# Altium schematic symbol library NTM_Other_Passives.SchLib: 12 symbols
Pins are listed as number, name and electrical type; pins without a type are passive.

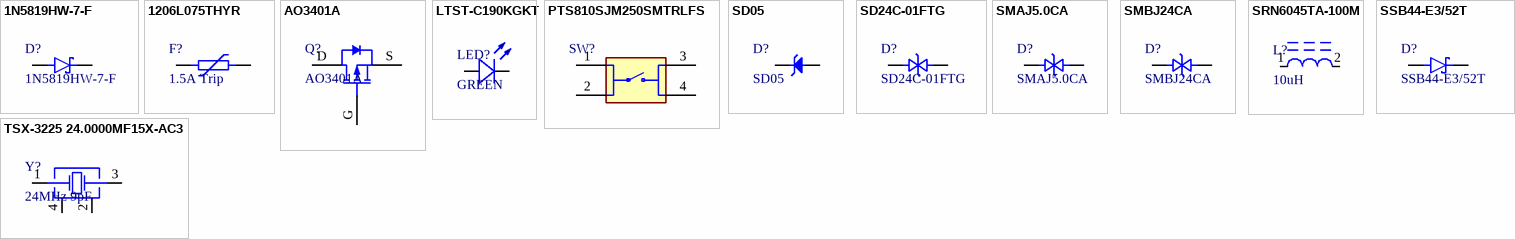
[diagram p0: symbols 1N5819HW-7-F to TSX-3225 24.0000MF15X-AC3]

## 1N5819HW-7-F
designator D?
1N5819HW Series 40 V 1 A Surface Mount Schottky Barrier Rectifier - SOD-123; Manufacturer: Diodes Inc.; Average Rectified Current: 1A; Capacitance: 50pF; Element Configuration: Single; Forward Voltage: 750mV; Max Forward Surge Current (Ifsm): 25A; Max Junction Temperature (Tj): 125°C; Max Power Dissipation: 450mW; Max Repetitive Reverse Voltage (Vrrm): 40V; Number of Elements: 1; Peak Reverse Current: 1mA; Polarity: Standard; Supplier 1: DigiKey; Manufacturer Part Number: 1N5819HW-7-F; RoHS: Compliant; Category: Schottky Diodes; Stock 1: 1016143; Pricing 1: 1=0.29, 10=0.178, 100=0.1108, 500=0.08152, 1000=0.07202 (USD); Case/Package: SOD-123-2; China RoHS: Compliant; Contact Plating: Tin; Current Rating: 1A; Forward Current: 1A; Height: 1.45mm; Lead Free: Lead Free; Length: 2.85mm; Lifecycle Status: Production; Max Operating Temperature: 125°C; Max Output Current: 1A; Max Reverse Voltage (DC): 40V; Min Breakdown Voltage: 40V; Min Operating Temperature: -65°C; Number of Pins: 2; Number of Terminals: 2; Output Current: 1A; Packaging: Tape and Reel; Peak Non-Repetitive Surge Current: 25A; Radiation Hardening: No; REACH SVHC: Yes; Reverse Standoff Voltage: 40V; Reverse Voltage: 40V; Schedule B: 8541100080, 8541100080|8541100080|8541100080|8541100080|8541100080; Termination: SMD/SMT; Voltage Rating (DC): 40V; Weight: 10.007382mg; Width: 1.7mm; ComponentLink1URL: https://datasheet.octopart.com:443/1N5819HW-7-F-Diodes-Inc.-datasheet-180549196.pdf?src-supplier=IHS; ComponentLink1Description: https://datasheet.octopart.com:443/1N5819HW-7-F-Diodes-Inc.-datasheet-180549196.pdf?src-supplier=IHS; ComponentLink2URL: https://datasheet.octopart.com:443/1N5819HW-7-F-Diodes-Inc.-datasheet-8332965.pdf?src-supplier=Upverter; ComponentLink2Description: https://datasheet.octopart.com:443/1N5819HW-7-F-Diodes-Inc.-datasheet-8332965.pdf?src-supplier=Upverter; ComponentLink3URL: https://sigma.octopart.com:443/138895985/technical_drawing/Diodes-Inc.-1N5819HW-7-F.pdf?src-supplier=Upverter; ComponentLink3Description: https://sigma.octopart.com:443/138895985/technical_drawing/Diodes-Inc.-1N5819HW-7-F.pdf?src-supplier=Upverter; ComponentLink4URL: https://datasheet.octopart.com:443/1N5819HW-7-F-Diodes-Inc.-datasheet-134530231.pdf?src-supplier=Future+Electronics; ComponentLink4Description: https://datasheet.octopart.com:443/1N5819HW-7-F-Diodes-Inc.-datasheet-134530231.pdf?src-supplier=Future+Electronics; ComponentLink5URL: https://datasheet.octopart.com:443/1N5819HW-7-F-Diodes-Inc.-datasheet-34441420.pdf?src-supplier=Future+Electronics; ComponentLink5Description: https://datasheet.octopart.com:443/1N5819HW-7-F-Diodes-Inc.-datasheet-34441420.pdf?src-supplier=Future+Electronics; ComponentLink6URL: https://datasheet.octopart.com:443/1N5819HW-7-F-Diodes-Inc.-datasheet-10497210.pdf?src-supplier=Future+Electronics; ComponentLink6Description: https://datasheet.octopart.com:443/1N5819HW-7-F-Diodes-Inc.-datasheet-10497210.pdf?src-supplier=Future+Electronics; ComponentLink7URL: https://datasheet.octopart.com:443/1N5819HW-7-F-Diodes-Inc.-datasheet-169364014.pdf?src-supplier=Newark; ComponentLink7Description: https://datasheet.octopart.com:443/1N5819HW-7-F-Diodes-Inc.-datasheet-169364014.pdf?src-supplier=Newark; ComponentLink8URL: https://datasheet.octopart.com:443/1N5819HW-7-F-Diodes-Inc.-datasheet-78715396.pdf?src-supplier=Newark; ComponentLink8Description: https://datasheet.octopart.com:443/1N5819HW-7-F-Diodes-Inc.-datasheet-78715396.pdf?src-supplier=Newark; ComponentLink9URL: https://datasheet.octopart.com:443/1N5819HW-7-F-Diodes-Inc.-datasheet-14053419.pdf?src-supplier=iiiC; ComponentLink9Description: https://datasheet.octopart.com:443/1N5819HW-7-F-Diodes-Inc.-datasheet-14053419.pdf?src-supplier=iiiC; ComponentLink10URL: https://datasheet.octopart.com:443/1N5819HW-7-F-Diodes-Inc.-datasheet-7274306.pdf?src-supplier=Jameco+(USA); ComponentLink10Description: https://datasheet.octopart.com:443/1N5819HW-7-F-Diodes-Inc.-datasheet-7274306.pdf?src-supplier=Jameco+(USA); ComponentLink11URL: https://datasheet.octopart.com:443/1N5819HW-7-F-Diodes-Inc.-datasheet-16627.pdf?src-supplier=Mouser; ComponentLink11Description: https://datasheet.octopart.com:443/1N5819HW-7-F-Diodes-Inc.-datasheet-16627.pdf?src-supplier=Mouser; ComponentLink12URL: https://datasheet.octopart.com:443/1N5819HW-7-F-Diodes-Inc.-datasheet-145195.pdf?src-supplier=DigiKey; ComponentLink12Description: https://datasheet.octopart.com:443/1N5819HW-7-F-Diodes-Inc.-datasheet-145195.pdf?src-supplier=DigiKey; ComponentLink13URL: http://sigma.octopart.com:80/15616867/materials_sheet/Diodes-Inc.-1N5819HW-7-F.pdf?src-supplier=Compliance+Statements; ComponentLink13Description: http://sigma.octopart.com:80/15616867/materials_sheet/Diodes-Inc.-1N5819HW-7-F.pdf?src-supplier=Compliance+Statements; Supplier Part Number 1: 1N5819HW-FDICT-ND
footprint FP-SOD123-MFG
pins: A, C

## 1206L075THYR
designator F?, comment 1.5A Trip
PTC Resettable Fuse 0.75A(hold) 1.5A(trip) 8VDC 100A 0.6W 0.2s 0.09Ohm SMD Solder Pad 1206 T/R; Manufacturer: Littelfuse; Manufacturer Part Number: 1206L075THYR; Approvals: TUV, cULus; Hold Current: 750mA; Maximum Resistance 1 Hour (R1max): 290mΩ; Max Supply Voltage (DC): 8V; Minimum Resistance Initial (Rmin): 90mΩ; Power Dissipation: 600mW; Ratings: TUV; Time to Trip: 200ms; Supplier 1: DigiKey; RoHS: Compliant; Category: PTC Resettable Fuses; Stock 1: 23337; Pricing 1: 1=0.64, 5=0.528, 10=0.488, 50=0.4048, 100=0.3734, 250=0.33572, 500=0.30966, 1000=0.28553 (USD); Case/Package: 1206; Case Code (Imperial): 1206; Case Code (Metric): 3216; China RoHS: Compliant; Current Rating: 100A; Export Control Classification Number (ECCN) Code: EAR99; Height: 750µm; Harmonized Tariff Schedule (HTS) Code: 8533.40.80.70; Introduction Date: 2009-08-04; Lead Free: Lead Free; Length: 3.4mm; Lifecycle Status: Production; Max Current Rating: 100A; Max Operating Temperature: 85°C; Max Voltage Rating (DC): 8V; Min Operating Temperature: -40°C; Mount: Surface Mount; Number of Terminals: 2; Operating Supply Voltage: 8V; Packaging: Cut Tape; REACH SVHC: Yes; Resistance: 90mΩ; Termination: SMD/SMT; Trip Current: 1.5A; Voltage Rating (DC): 8V; Width: 1.8mm; Working Voltage: 8V; ComponentLink1URL: https://datasheet.octopart.com:443/1206L075THYR-Littelfuse-datasheet-181956355.pdf?src-supplier=Farnell; ComponentLink1Description: https://datasheet.octopart.com:443/1206L075THYR-Littelfuse-datasheet-181956355.pdf?src-supplier=Farnell; ComponentLink2URL: https://datasheet.octopart.com:443/1206L075THYR-Littelfuse-datasheet-8722135.pdf?src-supplier=Farnell; ComponentLink2Description: https://datasheet.octopart.com:443/1206L075THYR-Littelfuse-datasheet-8722135.pdf?src-supplier=Farnell; ComponentLink3URL: https://datasheet.octopart.com:443/1206L075THYR-Littelfuse-datasheet-12510028.pdf?src-supplier=Farnell; ComponentLink3Description: https://datasheet.octopart.com:443/1206L075THYR-Littelfuse-datasheet-12510028.pdf?src-supplier=Farnell; ComponentLink4URL: https://datasheet.octopart.com:443/1206L075THYR-Littelfuse-datasheet-10365336.pdf?src-supplier=Farnell; ComponentLink4Description: https://datasheet.octopart.com:443/1206L075THYR-Littelfuse-datasheet-10365336.pdf?src-supplier=Farnell; ComponentLink5URL: https://datasheet.octopart.com:443/1206L075THYR-Littelfuse-datasheet-8701791.pdf?src-supplier=Farnell; ComponentLink5Description: https://datasheet.octopart.com:443/1206L075THYR-Littelfuse-datasheet-8701791.pdf?src-supplier=Farnell; ComponentLink6URL: https://datasheet.octopart.com:443/1206L075THYR-Littelfuse-datasheet-8325659.pdf?src-supplier=Farnell; ComponentLink6Description: https://datasheet.octopart.com:443/1206L075THYR-Littelfuse-datasheet-8325659.pdf?src-supplier=Farnell; ComponentLink7URL: https://datasheet.octopart.com:443/1206L075THYR-Littelfuse-datasheet-8821216.pdf?src-supplier=element14+APAC; ComponentLink7Description: https://datasheet.octopart.com:443/1206L075THYR-Littelfuse-datasheet-8821216.pdf?src-supplier=element14+APAC; ComponentLink8URL: https://datasheet.octopart.com:443/1206L075THYR-Littelfuse-datasheet-165518606.pdf?src-supplier=Newark; ComponentLink8Description: https://datasheet.octopart.com:443/1206L075THYR-Littelfuse-datasheet-165518606.pdf?src-supplier=Newark; ComponentLink9URL: https://datasheet.octopart.com:443/1206L075THYR-Littelfuse-datasheet-8814422.pdf?src-supplier=Newark; ComponentLink9Description: https://datasheet.octopart.com:443/1206L075THYR-Littelfuse-datasheet-8814422.pdf?src-supplier=Newark; ComponentLink10URL: https://datasheet.octopart.com:443/1206L075THYR-Littelfuse-datasheet-130008768.pdf?src-supplier=ODG+(Origin+Data+Global); ComponentLink10Description: https://datasheet.octopart.com:443/1206L075THYR-Littelfuse-datasheet-130008768.pdf?src-supplier=ODG+(Origin+Data+Global); ComponentLink11URL: https://datasheet.octopart.com:443/1206L075THYR-Littelfuse-datasheet-26530142.pdf?src-supplier=Fuses+Unlimited; ComponentLink11Description: https://datasheet.octopart.com:443/1206L075THYR-Littelfuse-datasheet-26530142.pdf?src-supplier=Fuses+Unlimited; ComponentLink12URL: https://datasheet.octopart.com:443/1206L075THYR-Littelfuse-datasheet-183575726.pdf?src-supplier=Sager+Electronics; ComponentLink12Description: https://datasheet.octopart.com:443/1206L075THYR-Littelfuse-datasheet-183575726.pdf?src-supplier=Sager+Electronics; ComponentLink13URL: https://datasheet.octopart.com:443/1206L075THYR-Littelfuse-datasheet-176144932.pdf?src-supplier=Sager+Electronics; ComponentLink13Description: https://datasheet.octopart.com:443/1206L075THYR-Littelfuse-datasheet-176144932.pdf?src-supplier=Sager+Electronics; ComponentLink14URL: https://datasheet.octopart.com:443/1206L075THYR-Littelfuse-datasheet-170674161.pdf?src-supplier=Future+Electronics; ComponentLink14Description: https://datasheet.octopart.com:443/1206L075THYR-Littelfuse-datasheet-170674161.pdf?src-supplier=Future+Electronics; ComponentLink15URL: https://datasheet.octopart.com:443/1206L075THYR-Littelfuse-datasheet-20852186.pdf?src-supplier=Future+Electronics; ComponentLink15Description: https://datasheet.octopart.com:443/1206L075THYR-Littelfuse-datasheet-20852186.pdf?src-supplier=Future+Electronics; ComponentLink16URL: https://datasheet.octopart.com:443/1206L075THYR-Littelfuse-datasheet-177174148.pdf?src-supplier=Burklin+Elektronik; ComponentLink16Description: https://datasheet.octopart.com:443/1206L075THYR-Littelfuse-datasheet-177174148.pdf?src-supplier=Burklin+Elektronik; Supplier Part Number 1: F3370CT-ND
footprint 1206_PTC
pins: 1, 2

## AO3401A
designator Q?
Transistor: P-MOSFET; unipolar; -30V; 4, 2A; 1, 4W; 85 mOhm; ; -55+150 st.C; SMD; SOT23; Manufacturer: Alpha & Omega Semiconductor; Continuous Drain Current (ID): 4A; Drain to Source Resistance: 50mΩ; Gate to Source Voltage (Vgs): 12V; Input Capacitance: 1.2nF; Max Junction Temperature (Tj): 150°C; Max Power Dissipation: 1.4W; Min Breakdown Voltage: 30V; Number of Channels: 1; Rds On Max: 44mΩ; Threshold Voltage: -900mV; Turn-Off Delay Time: 41ns; Turn-On Delay Time: 6.5ns; Supplier 1: DigiKey; Manufacturer Part Number: AO3401A; RoHS: Compliant; Category: MOSFETs; Stock 1: 230075; Pricing 1: 1=0.52, 10=0.322, 100=0.2043, 500=0.15316, 1000=0.13665 (USD); Case/Package: TO-236-3; Country of Origin: Mainland China; Drain to Source Breakdown Voltage: -30V; Drain to Source Voltage (Vdss): -30V; Export Control Classification Number (ECCN) Code: EAR99; Height: 1.25mm; Introduction Date: 2007-04-10; Lead Free: Lead Free; Lifecycle Status: Production; Max Operating Temperature: 150°C; Min Operating Temperature: -55°C; Mount: Surface Mount; Number of Elements: 1; Number of Pins: 3; Number of Terminals: 3; Power Dissipation: 1.4W; Radiation Hardening: No; REACH SVHC: Yes; Schedule B: 8541290080, 8541290080|8541290080|8541290080|8541290080|8541290080; ComponentLink1URL: https://datasheet.octopart.com:443/AO3401A-Alpha-%26-Omega-Semiconductor-datasheet-11631723.pdf?src-supplier=IHS; ComponentLink1Description: https://datasheet.octopart.com:443/AO3401A-Alpha-%26-Omega-Semiconductor-datasheet-11631723.pdf?src-supplier=IHS; ComponentLink2URL: https://sigma.octopart.com:443/138895710/technical_drawing/Alpha-%26-Omega-Semiconductor-AO3401A.pdf?src-supplier=Upverter; ComponentLink2Description: https://sigma.octopart.com:443/138895710/technical_drawing/Alpha-%26-Omega-Semiconductor-AO3401A.pdf?src-supplier=Upverter; ComponentLink3URL: https://sigma.octopart.com:443/140150677/technical_drawing/Alpha-%26-Omega-Semiconductor-AO3401A.pdf?src-supplier=Alpha+%26+Omega+Semiconductor+SCT; ComponentLink3Description: https://sigma.octopart.com:443/140150677/technical_drawing/Alpha-%26-Omega-Semiconductor-AO3401A.pdf?src-supplier=Alpha+%26+Omega+Semiconductor+SCT; ComponentLink4URL: https://datasheet.octopart.com:443/AO3401A-Alpha-%26-Omega-Semiconductor-datasheet-14060796.pdf?src-supplier=iiiC; ComponentLink4Description: https://datasheet.octopart.com:443/AO3401A-Alpha-%26-Omega-Semiconductor-datasheet-14060796.pdf?src-supplier=iiiC; Supplier Part Number 1: 785-1001-1-ND
footprint AO-SOT-23-3L_V (SOT23, 3-Leads, Body 3.1x1.8mm, Pitch 0.95mm)
pins: D DRAIN, G GATE, S SOURCE

## LTST-C190KGKT
designator LED?, comment GREEN
LED yellow green 0603 wavelength 567.5nm~576.5nm light intensity 18mcd~71mcd Front Mounting; Manufacturer: Diodes Inc.; Manufacturer Part Number: LTST-C190KGKT; Dominant Wavelength: 571nm; Forward Current: 30mA; Forward Voltage: 2.15V; Lens Color: Clear, Colorless; Lens Style: Clear; Luminous Intensity: 35mcd; Number of Circuits: 1; Peak Wavelength: 574nm; Power Dissipation: 75mW; Reverse Voltage: 5V; Shape: Rectangular; Test Current: 20mA; Viewing Angle: 130°; Supplier 1: DigiKey; RoHS: Compliant; Category: LEDs; Stock 1: 2033232; Pricing 1: 1=0.13, 10=0.088, 100=0.0603, 500=0.04758, 1000=0.04332, 2000=0.03968 (USD); Case/Package: 0603; Case Code (Imperial): 0603; Case Code (Metric): 1608; China RoHS: Compliant; Color: Green; Depth: 800µm; Height: 800µm; Illumination Color: Green; Lead Free: Lead Free; Length: 1.6mm; Lens Transparency: Clear; Lifecycle Status: Production; Max Operating Temperature: 85°C; Min Operating Temperature: -30°C; Mount: Surface Mount; Number of Elements: 1; Number of LEDs: 1; Number of Pins: 2; Number of Terminals: 2; Power Rating: 75mW; Radiation Hardening: No; REACH SVHC: Yes; Schedule B: 8541402000, 8541402000|8541402000|8541402000|8541402000|8541402000|8541402000|8541402000|8541402000|8541402000|8541402000|8541402000|8541402000|8541402000|8541402000|8541402000|8541402000|8541402000|8541402000|8541402000|8541402000|8541402000|8541402000|8541402000|85; Terminal Pitch: 1.5mm; Wavelength: 574nm; Width: 800µm; ComponentLink1URL: https://datasheet.octopart.com:443/LTST-C190KGKT-Lite-On-datasheet-86397316.pdf?src-supplier=ODG+(Origin+Data+Global); ComponentLink1Description: https://datasheet.octopart.com:443/LTST-C190KGKT-Lite-On-datasheet-86397316.pdf?src-supplier=ODG+(Origin+Data+Global); ComponentLink2URL: https://datasheet.octopart.com:443/LTST-C190KGKT-Lite-On-datasheet-180605179.pdf?src-supplier=IHS; ComponentLink2Description: https://datasheet.octopart.com:443/LTST-C190KGKT-Lite-On-datasheet-180605179.pdf?src-supplier=IHS; ComponentLink3URL: https://datasheet.octopart.com:443/LTST-C190KGKT-Lite-On-datasheet-13693967.pdf?src-supplier=Factory+Futures; ComponentLink3Description: https://datasheet.octopart.com:443/LTST-C190KGKT-Lite-On-datasheet-13693967.pdf?src-supplier=Factory+Futures; ComponentLink4URL: https://datasheet.octopart.com:443/LTST-C190KGKT-Lite-On-datasheet-165573809.pdf?src-supplier=TME; ComponentLink4Description: https://datasheet.octopart.com:443/LTST-C190KGKT-Lite-On-datasheet-165573809.pdf?src-supplier=TME; ComponentLink5URL: https://datasheet.octopart.com:443/LTST-C190KGKT-Lite-On-datasheet-165573808.pdf?src-supplier=TME; ComponentLink5Description: https://datasheet.octopart.com:443/LTST-C190KGKT-Lite-On-datasheet-165573808.pdf?src-supplier=TME; ComponentLink6URL: https://datasheet.octopart.com:443/LTST-C190KGKT-Lite-On-datasheet-43775815.pdf?src-supplier=TME; ComponentLink6Description: https://datasheet.octopart.com:443/LTST-C190KGKT-Lite-On-datasheet-43775815.pdf?src-supplier=TME; ComponentLink7URL: https://datasheet.octopart.com:443/LTST-C190KGKT-Lite-On-datasheet-32046999.pdf?src-supplier=Future+Electronics; ComponentLink7Description: https://datasheet.octopart.com:443/LTST-C190KGKT-Lite-On-datasheet-32046999.pdf?src-supplier=Future+Electronics; ComponentLink8URL: https://datasheet.octopart.com:443/LTST-C190KGKT-Lite-On-datasheet-8326678.pdf?src-supplier=Future+Electronics; ComponentLink8Description: https://datasheet.octopart.com:443/LTST-C190KGKT-Lite-On-datasheet-8326678.pdf?src-supplier=Future+Electronics; ComponentLink9URL: https://datasheet.octopart.com:443/LTST-C190KGKT-Lite-On-datasheet-78838574.pdf?src-supplier=Future+Electronics; ComponentLink9Description: https://datasheet.octopart.com:443/LTST-C190KGKT-Lite-On-datasheet-78838574.pdf?src-supplier=Future+Electronics; ComponentLink10URL: https://datasheet.octopart.com:443/LTST-C190KGKT-Lite-On-datasheet-158288.pdf?src-supplier=Mouser; ComponentLink10Description: https://datasheet.octopart.com:443/LTST-C190KGKT-Lite-On-datasheet-158288.pdf?src-supplier=Mouser; ComponentLink11URL: https://datasheet.octopart.com:443/LTST-C190KGKT-Lite-On-datasheet-49281.pdf?src-supplier=DigiKey; ComponentLink11Description: https://datasheet.octopart.com:443/LTST-C190KGKT-Lite-On-datasheet-49281.pdf?src-supplier=DigiKey; ComponentLink12URL: https://datasheet.octopart.com:443/LTST-C190KGKT-Lite-On-datasheet-14174998.pdf?src-supplier=iiiC; ComponentLink12Description: https://datasheet.octopart.com:443/LTST-C190KGKT-Lite-On-datasheet-14174998.pdf?src-supplier=iiiC
footprint 0603_LED
pins: A V+, C V-

## PTS810SJM250SMTRLFS
designator SW?, comment SPST N.O. Button  (value not drawn)
Switch Tactile N.O. SPST Button J-Bend 0.05A 16V 150000Cycles 1.569N SMD T/R; Manufacturer: C&K Components; Manufacturer Part Number: PTS810SJM250SMTRLFS; Actuator Length: 711.2µm; Contact Current Rating: 50mA; Contact Resistance: 500mΩ; Electrical Life: 150kcycles; Illumination Type: Non-Illuminated; Insulation Resistance: 100MΩ; Number of Positions: 1; Operating Force: 1.57N; Switch Function: Off-Mom; Switch Travel: 150µm; Supplier 1: DigiKey; RoHS: Compliant; Category: Tactile Switches; Stock 1: 70955; Pricing 1: 1=0.58, 10=0.501, 25=0.4672, 100=0.4173, 250=0.38652, 500=0.36488, 1000=0.34488 (USD); Case/Package: SMD/SMT; Color: Black; Contact Plating: Silver; Country of Origin: Mainland China; Current Rating: 50mA; Depth: 4.6mm; Export Control Classification Number (ECCN) Code: EAR99; Height: 1.8mm; Harmonized Tariff Schedule (HTS) Code: 8536.50.90.40; Introduction Date: 2013-03-04; Lead Free: Lead Free; Length: 4.2mm; Life (Cycles): 150kcycles; Lifecycle Status: Production; Max Current Rating: 50mA; Max Operating Temperature: 85°C; Max Voltage Rating (DC): 16V; Mechanical Life: 150kcycles; Manufacturer Package Identifier: PTS810SJM250SMTRLFS; Min Operating Temperature: -40°C; Mount: Surface Mount; Number of Pins: 4; Orientation: Straight; REACH SVHC: Yes; Termination: Solder; Throw Configuration: SPST; Voltage Rating (DC): 16V; ComponentLink1URL: https://datasheet.octopart.com:443/PTS810SJM250SMTRLFS-C%26K-Components-datasheet-180017475.pdf?src-supplier=IHS; ComponentLink1Description: https://datasheet.octopart.com:443/PTS810SJM250SMTRLFS-C%26K-Components-datasheet-180017475.pdf?src-supplier=IHS; ComponentLink2URL: https://datasheet.octopart.com:443/PTS810SJM250SMTRLFS-C%26K-Components-datasheet-67873722.pdf?src-supplier=Upverter; ComponentLink2Description: https://datasheet.octopart.com:443/PTS810SJM250SMTRLFS-C%26K-Components-datasheet-67873722.pdf?src-supplier=Upverter; ComponentLink3URL: https://datasheet.octopart.com:443/PTS810-SJM-250-SMTR-LFS-C%26K-Components-datasheet-41562126.pdf?src-supplier=Upverter; ComponentLink3Description: https://datasheet.octopart.com:443/PTS810-SJM-250-SMTR-LFS-C%26K-Components-datasheet-41562126.pdf?src-supplier=Upverter; ComponentLink4URL: https://datasheet.octopart.com:443/PTS810SJM250SMTR-LFS-C%26K-Components-datasheet-181955281.pdf?src-supplier=Farnell; ComponentLink4Description: https://datasheet.octopart.com:443/PTS810SJM250SMTR-LFS-C%26K-Components-datasheet-181955281.pdf?src-supplier=Farnell; ComponentLink5URL: https://datasheet.octopart.com:443/PTS810SJM250SMTRLFS-C%26K-Components-datasheet-134606748.pdf?src-supplier=TME; ComponentLink5Description: https://datasheet.octopart.com:443/PTS810SJM250SMTRLFS-C%26K-Components-datasheet-134606748.pdf?src-supplier=TME; ComponentLink6URL: https://datasheet.octopart.com:443/PTS810-SJM-250-SMTR-LFS-C%26K-Components-datasheet-151508687.pdf?src-supplier=TME; ComponentLink6Description: https://datasheet.octopart.com:443/PTS810-SJM-250-SMTR-LFS-C%26K-Components-datasheet-151508687.pdf?src-supplier=TME; ComponentLink7URL: http://sigma.octopart.com:80/reach_statement/ITT-company-18.pdf?src-supplier=Compliance+Statements; ComponentLink7Description: http://sigma.octopart.com:80/reach_statement/ITT-company-18.pdf?src-supplier=Compliance+Statements
footprint SW4_PTS815 SJM 250 SMTR LFS_CNK
pins: 1, 2, 3, 4

## SD05
designator D?
Trans Voltage Suppressor Diode, 350W, 5V V(RWM), Unidirectional, 1 Element, Silicon; Manufacturer: Sangdest Microelectronics; Clamping Voltage: 14.5V; Min Breakdown Voltage: 6V; Number of Elements: 1; Peak Reverse Current: 10µA; Supplier 1: DigiKey; Manufacturer Part Number: SD05; RoHS: Compliant; Category: TVS Diodes; Stock 1: 13210; Pricing 1: 1=0.27, 10=0.165, 100=0.1025, 500=0.0752, 1000=0.06636 (USD); Lifecycle Status: Production; Max Operating Temperature: 125°C; Min Operating Temperature: -55°C; Number of Terminals: 2; Peak Pulse Power: 350W; Polarity: Unidirectional; REACH SVHC: Yes; Reverse Standoff Voltage: 5V; ComponentLink1URL: https://datasheet.octopart.com:443/SD05-SMC-Diode-Solutions-datasheet-181400473.pdf?src-supplier=IHS; ComponentLink1Description: https://datasheet.octopart.com:443/SD05-SMC-Diode-Solutions-datasheet-181400473.pdf?src-supplier=IHS; Supplier Part Number 1: 1655-SD05CT-ND
footprint DIO_MM3Z3V0T1G
pins: A, K

## SD24C-01FTG
designator D?
SD Series 42 V 7 A 450 W Surface Mount Bidirectional TVS Diode - SOD-323; Manufacturer: Littelfuse; Breakdown Voltage: 26.7V; Capacitance: 50pF; Clamping Voltage: 42V; Element Configuration: Single; Leakage Current: 1µA; Max Power Dissipation: 450W; Max Surge Current: 7A; Number of Bidirectional Channels: 1; Operating Supply Voltage: 24V; Power Line Protection: No; Supplier 1: DigiKey; Manufacturer Part Number: SD24C-01FTG; RoHS: Compliant; Category: TVS Diodes; Stock 1: 22762; Pricing 1: 1=0.66, 10=0.407, 100=0.2598, 500=0.19638, 1000=0.17589 (USD); Case/Package: SOD; Composition: Zener; Depth: 1.4mm; Direction: Bidirectional; Height: 1.14mm; Lead Free: Lead Free; Length: 1.8mm; Lifecycle Status: Production; Max Operating Temperature: 125°C; Min Breakdown Voltage: 26.7V; Min Operating Temperature: -40°C; Mount: Surface Mount; Number of Channels: 1; Number of Elements: 1; Number of Pins: 2; Number of Terminals: 2; Peak Pulse Current: 7A; Peak Pulse Power: 450W; Polarity: Bidirectional; Radiation Hardening: No; Ratings: AEC-Q101; REACH SVHC: Yes; Reverse Standoff Voltage: 24V; Schedule B: 8536300000, 8536300000|8536300000|8536300000|8536300000|8536300000; Termination: SMD/SMT; Working Voltage: 24V; ComponentLink1URL: https://datasheet.octopart.com:443/SD24C-01FTG-Littelfuse-datasheet-168252985.pdf?src-supplier=Newark; ComponentLink1Description: https://datasheet.octopart.com:443/SD24C-01FTG-Littelfuse-datasheet-168252985.pdf?src-supplier=Newark; ComponentLink2URL: https://datasheet.octopart.com:443/SD24C-01FTG-Littelfuse-datasheet-32866225.pdf?src-supplier=Newark; ComponentLink2Description: https://datasheet.octopart.com:443/SD24C-01FTG-Littelfuse-datasheet-32866225.pdf?src-supplier=Newark; ComponentLink3URL: https://datasheet.octopart.com:443/SD24C-01FTG-Littelfuse-datasheet-138797050.pdf?src-supplier=ODG+(Origin+Data+Global); ComponentLink3Description: https://datasheet.octopart.com:443/SD24C-01FTG-Littelfuse-datasheet-138797050.pdf?src-supplier=ODG+(Origin+Data+Global); ComponentLink4URL: https://datasheet.octopart.com:443/SD24C-01FTG-Littelfuse-datasheet-78834560.pdf?src-supplier=Farnell; ComponentLink4Description: https://datasheet.octopart.com:443/SD24C-01FTG-Littelfuse-datasheet-78834560.pdf?src-supplier=Farnell; ComponentLink5URL: https://datasheet.octopart.com:443/SD24C-01FTG-Littelfuse-datasheet-42901060.pdf?src-supplier=Fuses+Unlimited; ComponentLink5Description: https://datasheet.octopart.com:443/SD24C-01FTG-Littelfuse-datasheet-42901060.pdf?src-supplier=Fuses+Unlimited; ComponentLink6URL: https://datasheet.octopart.com:443/SD24C-01FTG-Littelfuse-datasheet-173466928.pdf?src-supplier=Future+Electronics; ComponentLink6Description: https://datasheet.octopart.com:443/SD24C-01FTG-Littelfuse-datasheet-173466928.pdf?src-supplier=Future+Electronics; ComponentLink7URL: https://datasheet.octopart.com:443/SD24C-01FTG-Littelfuse-datasheet-137408339.pdf?src-supplier=RS+(Formerly+Allied+Electronics); ComponentLink7Description: https://datasheet.octopart.com:443/SD24C-01FTG-Littelfuse-datasheet-137408339.pdf?src-supplier=RS+(Formerly+Allied+Electronics); Supplier Part Number 1: F6446CT-ND
footprint FP-SD-C-MFG
pins: 1, 2

## SMAJ5.0CA
designator D?
DO-214AC SMA SMAJ 1 Surface Mount Zener Tvs Diode 6.4V 43.5A 400W 1.05nF; Manufacturer: Littelfuse; Breakdown Voltage: 6.7V; Clamping Voltage: 9.2V; Direction: Bidirectional; Element Configuration: Single; Forward Voltage: 3.5V; Leakage Current: 1.6mA; Max Breakdown Voltage: 7V; Max Junction Temperature (Tj): 150°C; Max Power Dissipation: 3.3W; Max Reverse Leakage Current: 800µA; Number of Bidirectional Channels: 1; Operating Supply Voltage: 5V; Power Line Protection: No; Test Current: 10mA; Supplier 1: DigiKey; Manufacturer Part Number: SMAJ5.0CA; RoHS: Compliant; Category: TVS Diodes; Stock 1: 14649; Pricing 1: 1=0.48, 10=0.295, 100=0.1863, 500=0.13922, 1000=0.124, 2000=0.11117 (USD); Capacitance: 1.05nF; China RoHS: Non-Compliant; Composition: Zener; Height: 2.29mm; Lead Free: Lead Free; Length: 4.5mm; Lifecycle Status: Production; Max Operating Temperature: 150°C; Max Output Current: 43.5A; Max Surge Current: 43.5A; Min Breakdown Voltage: 6.4V; Min Operating Temperature: -65°C; Mount: Surface Mount; Number of Channels: 1; Number of Elements: 1; Number of Pins: 2; Number of Terminals: 2; Packaging: Tape & Reel; Peak Pulse Current: 43.5A; Peak Pulse Power: 400W; Peak Reverse Current: 800µA; Polarity: Bidirectional; Power Dissipation: 400W; Power Rating: 400W; Radiation Hardening: No; REACH SVHC: No; Reverse Breakdown Voltage: 6.4V; Reverse Standoff Voltage: 5V; Reverse Voltage: 5V; Schedule B: 8541100080, 8541100080|8541100080|8541100080|8541100080|8541100080; Termination: SMD/SMT; Voltage Rating (DC): 5V; Width: 2.79mm; ComponentLink1URL: https://datasheet.octopart.com:443/SMAJ5.0CA-Littelfuse-datasheet-150463581.pdf?src-supplier=IHS; ComponentLink1Description: https://datasheet.octopart.com:443/SMAJ5.0CA-Littelfuse-datasheet-150463581.pdf?src-supplier=IHS; ComponentLink2URL: https://datasheet.octopart.com:443/SMAJ5.0CA-Littelfuse-datasheet-11547152.pdf?src-supplier=element14+APAC; ComponentLink2Description: https://datasheet.octopart.com:443/SMAJ5.0CA-Littelfuse-datasheet-11547152.pdf?src-supplier=element14+APAC; ComponentLink3URL: https://datasheet.octopart.com:443/SMAJ5.0CA-Littelfuse-datasheet-5393952.pdf?src-supplier=element14+APAC; ComponentLink3Description: https://datasheet.octopart.com:443/SMAJ5.0CA-Littelfuse-datasheet-5393952.pdf?src-supplier=element14+APAC; ComponentLink4URL: https://datasheet.octopart.com:443/SMAJ5.0CA-Littelfuse-datasheet-511791.pdf?src-supplier=element14+APAC; ComponentLink4Description: https://datasheet.octopart.com:443/SMAJ5.0CA-Littelfuse-datasheet-511791.pdf?src-supplier=element14+APAC; ComponentLink5URL: https://datasheet.octopart.com:443/SMAJ5.0CA-Littelfuse-datasheet-63710798.pdf?src-supplier=Farnell; ComponentLink5Description: https://datasheet.octopart.com:443/SMAJ5.0CA-Littelfuse-datasheet-63710798.pdf?src-supplier=Farnell; ComponentLink6URL: https://datasheet.octopart.com:443/SMAJ5.0CA-Littelfuse-datasheet-165289143.pdf?src-supplier=Electro+Sonic; ComponentLink6Description: https://datasheet.octopart.com:443/SMAJ5.0CA-Littelfuse-datasheet-165289143.pdf?src-supplier=Electro+Sonic; ComponentLink7URL: https://datasheet.octopart.com:443/SMAJ5.0CA-Littelfuse-datasheet-1053.pdf?src-supplier=DigiKey; ComponentLink7Description: https://datasheet.octopart.com:443/SMAJ5.0CA-Littelfuse-datasheet-1053.pdf?src-supplier=DigiKey; ComponentLink8URL: https://datasheet.octopart.com:443/SMAJ5.0CA-Littelfuse-datasheet-164649624.pdf?src-supplier=JRH+Electronics; ComponentLink8Description: https://datasheet.octopart.com:443/SMAJ5.0CA-Littelfuse-datasheet-164649624.pdf?src-supplier=JRH+Electronics; ComponentLink9URL: https://datasheet.octopart.com:443/SMAJ5.0CA-Littelfuse-datasheet-17901671.pdf?src-supplier=Future+Electronics; ComponentLink9Description: https://datasheet.octopart.com:443/SMAJ5.0CA-Littelfuse-datasheet-17901671.pdf?src-supplier=Future+Electronics; Supplier Part Number 1: SMAJ5.0CALFCT-ND
footprint DIOM5026X229N
pins: 1, 2

## SMBJ24CA
designator D?
Diode; 15.5 A (Max.); 26.70 V (Min.) @ 1 mA; 5 uA (Max.) @ 24 V; 100 A (Max.); Manufacturer: Littelfuse; Breakdown Voltage: 28.1V; Clamping Voltage: 38.9V; Direction: Bidirectional; Element Configuration: Single; ESD Protection: Yes; Leakage Current: 1µA; Max Breakdown Voltage: 29.5V; Max Junction Temperature (Tj): 150°C; Max Power Dissipation: 5W; Max Surge Current: 15.5A; Min Breakdown Voltage: 26.7V; Number of Bidirectional Channels: 1; Operating Supply Voltage: 24V; Peak Pulse Power: 600W; Power Line Protection: No; Test Current: 1mA; Supplier 1: Arrow Electronics; Manufacturer Part Number: SMBJ24CA; RoHS: Compliant; Category: TVS Diodes; Stock 1: 36000; Pricing 1: 3000=0.0667 (USD); Case/Package: SMB; China RoHS: Non-Compliant; Composition: Zener; Country of Origin: Mainland China, Philippines; Export Control Classification Number (ECCN) Code: EAR99; Height: 2.61mm; Harmonized Tariff Schedule (HTS) Code: 8541.10.00.50; Introduction Date: 1996-01-01; Lead Free: Lead Free; Length: 4.5466mm; Lifecycle Status: Production; Max Operating Temperature: 150°C; Max Reverse Leakage Current: 1µA; Min Operating Temperature: -65°C; Mount: Surface Mount; Number of Channels: 1; Number of Elements: 1; Number of Pins: 2; Number of Terminals: 2; Packaging: Tape & Reel; Peak Pulse Current: 15.5A; Peak Reverse Current: 1µA; Polarity: Bidirectional; Power Rating: 600W; Radiation Hardening: No; REACH SVHC: No; Reverse Breakdown Voltage: 26.7V; Reverse Standoff Voltage: 24V; Reverse Voltage: 24V; Schedule B: 8541100080, 8541100080|8541100080|8541100080|8541100080|8541100080; Termination: SMD/SMT; Voltage Rating (DC): 24V; Width: 3.937mm; ComponentLink1URL: https://datasheet.octopart.com:443/SMBJ24CA-Littelfuse-datasheet-180609570.pdf?src-supplier=IHS; ComponentLink1Description: https://datasheet.octopart.com:443/SMBJ24CA-Littelfuse-datasheet-180609570.pdf?src-supplier=IHS; ComponentLink2URL: https://datasheet.octopart.com:443/SMBJ24CA-Littelfuse-datasheet-27889791.pdf?src-supplier=Upverter; ComponentLink2Description: https://datasheet.octopart.com:443/SMBJ24CA-Littelfuse-datasheet-27889791.pdf?src-supplier=Upverter; ComponentLink3URL: https://datasheet.octopart.com:443/SMBJ24CA-Littelfuse-datasheet-63710821.pdf?src-supplier=Farnell; ComponentLink3Description: https://datasheet.octopart.com:443/SMBJ24CA-Littelfuse-datasheet-63710821.pdf?src-supplier=Farnell; ComponentLink4URL: https://datasheet.octopart.com:443/SMBJ24CA-Littelfuse-datasheet-145017494.pdf?src-supplier=Farnell; ComponentLink4Description: https://datasheet.octopart.com:443/SMBJ24CA-Littelfuse-datasheet-145017494.pdf?src-supplier=Farnell; ComponentLink5URL: https://datasheet.octopart.com:443/SMBJ24CA-Littelfuse-datasheet-10854588.pdf?src-supplier=element14+APAC; ComponentLink5Description: https://datasheet.octopart.com:443/SMBJ24CA-Littelfuse-datasheet-10854588.pdf?src-supplier=element14+APAC; ComponentLink6URL: https://datasheet.octopart.com:443/SMBJ24CA-Littelfuse-datasheet-5319440.pdf?src-supplier=element14+APAC; ComponentLink6Description: https://datasheet.octopart.com:443/SMBJ24CA-Littelfuse-datasheet-5319440.pdf?src-supplier=element14+APAC; ComponentLink7URL: https://datasheet.octopart.com:443/SMBJ24CA-Littelfuse-datasheet-98958142.pdf?src-supplier=LKR; ComponentLink7Description: https://datasheet.octopart.com:443/SMBJ24CA-Littelfuse-datasheet-98958142.pdf?src-supplier=LKR; ComponentLink8URL: https://datasheet.octopart.com:443/SMBJ24CA-Littelfuse-datasheet-871.pdf?src-supplier=Newark; ComponentLink8Description: https://datasheet.octopart.com:443/SMBJ24CA-Littelfuse-datasheet-871.pdf?src-supplier=Newark; ComponentLink9URL: https://datasheet.octopart.com:443/SMBJ24CA-Littelfuse-datasheet-123574.pdf?src-supplier=Newark; ComponentLink9Description: https://datasheet.octopart.com:443/SMBJ24CA-Littelfuse-datasheet-123574.pdf?src-supplier=Newark; ComponentLink10URL: https://datasheet.octopart.com:443/SMBJ24CA-Littelfuse-datasheet-9692587.pdf?src-supplier=RS+(Formerly+Allied+Electronics); ComponentLink10Description: https://datasheet.octopart.com:443/SMBJ24CA-Littelfuse-datasheet-9692587.pdf?src-supplier=RS+(Formerly+Allied+Electronics); ComponentLink11URL: https://datasheet.octopart.com:443/SMBJ24CA-Littelfuse-datasheet-22888.pdf?src-supplier=RS+(Formerly+Allied+Electronics); ComponentLink11Description: https://datasheet.octopart.com:443/SMBJ24CA-Littelfuse-datasheet-22888.pdf?src-supplier=RS+(Formerly+Allied+Electronics); Supplier Part Number 1: SMBJ24CA
footprint SMBJSeries_LTF
pins: 1, 2

## SRN6045TA-100M
designator L?, comment 10uH
Ind Power Semi-Shielded Wirewound 10uH ±20% 1MHz 15 Q-Factor Ferrite 3.2A T/R; Manufacturer: Bourns; Manufacturer Part Number: SRN6045TA-100M; DC Resistance (DCR): 52mΩ; Inductance: 10µH; Number of Circuits: 1; Q Factor: 15; Saturation Current: 4.6A; Self Resonant Frequency: 25MHz; Series Resistance: 62.4mΩ; Supplier 1: DigiKey; RoHS: Compliant; Category: Fixed Inductors; Stock 1: 8792; Pricing 1: 1=0.46, 10=0.382, 100=0.3137 (USD); Case/Package: 2424; China RoHS: Compliant; Composition: Wirewound; Contact Plating: Tin; Core Material: Ferrite; Country of Origin: Mainland China; Current Rating: 3.2A; Export Control Classification Number (ECCN) Code: EAR99; Height: 4.2mm; Harmonized Tariff Schedule (HTS) Code: 8504.50.80.00; Inductance Tolerance: 20%; Introduction Date: 2016-07-20; Length: 6mm; Lifecycle Status: Production; Max Current Rating: 3.2A; Max Operating Temperature: 125°C; Min Operating Temperature: -55°C; Mount: Surface Mount; Number of Terminals: 2; Packaging: Cut Tape; Ratings: AEC-Q200; REACH SVHC: Yes; Resistance: 52mΩ; RMS Current (Irms): 3.2A; Schedule B: 8504500000, 8504500000|8504500000, 8504500000|8504500000|8504500000, 8504500000|8504500000|8504500000|8504500000; Shielding: Shielded; Test Frequency: 1MHz; Tolerance: 20%; Width: 6mm; ComponentLink1URL: https://datasheet.octopart.com:443/SRN6045TA-100M-Bourns-datasheet-156155930.pdf?src-supplier=IHS; ComponentLink1Description: https://datasheet.octopart.com:443/SRN6045TA-100M-Bourns-datasheet-156155930.pdf?src-supplier=IHS; ComponentLink2URL: https://datasheet.octopart.com:443/SRN6045TA-100M-Bourns-datasheet-68554779.pdf?src-supplier=element14+APAC; ComponentLink2Description: https://datasheet.octopart.com:443/SRN6045TA-100M-Bourns-datasheet-68554779.pdf?src-supplier=element14+APAC; ComponentLink3URL: https://datasheet.octopart.com:443/SRN6045TA-100M-Bourns-datasheet-66075751.pdf?src-supplier=Newark; ComponentLink3Description: https://datasheet.octopart.com:443/SRN6045TA-100M-Bourns-datasheet-66075751.pdf?src-supplier=Newark; ComponentLink4URL: https://datasheet.octopart.com:443/SRN6045TA-100M-Bourns-datasheet-154729936.pdf?src-supplier=Electro+Sonic; ComponentLink4Description: https://datasheet.octopart.com:443/SRN6045TA-100M-Bourns-datasheet-154729936.pdf?src-supplier=Electro+Sonic; ComponentLink5URL: https://datasheet.octopart.com:443/SRN6045TA-100M-Bourns-datasheet-189440480.pdf?src-supplier=JRH+Electronics; ComponentLink5Description: https://datasheet.octopart.com:443/SRN6045TA-100M-Bourns-datasheet-189440480.pdf?src-supplier=JRH+Electronics; ComponentLink6URL: https://datasheet.octopart.com:443/SRN6045TA-100M-Bourns-datasheet-154729571.pdf?src-supplier=RS+(Formerly+Allied+Electronics); ComponentLink6Description: https://datasheet.octopart.com:443/SRN6045TA-100M-Bourns-datasheet-154729571.pdf?src-supplier=RS+(Formerly+Allied+Electronics); ComponentLink7URL: http://sigma.octopart.com:80/conflict_mineral_statement/Bourns-company-36.pdf?src-supplier=Compliance+Statements; ComponentLink7Description: http://sigma.octopart.com:80/conflict_mineral_statement/Bourns-company-36.pdf?src-supplier=Compliance+Statements; Supplier Part Number 1: SRN6045TA-100MCT-ND
footprint FP-SRN6045TA-MFG
pins: 1, 2

## SSB44-E3/52T
designator D?
Schottky diode forward voltage drop (Vf) 490mV@4A DC reverse withstand voltage (Vr) 40V; Manufacturer: Vishay; Average Rectified Current: 4A; Element Configuration: Single; Forward Voltage: 420mV; Max Forward Surge Current (Ifsm): 100A; Max Junction Temperature (Tj): 150°C; Max Reverse Leakage Current: 400µA; Number of Elements: 1; Polarity: Standard; Supplier 1: DigiKey; Manufacturer Part Number: SSB44-E3/52T; RoHS: Compliant; Category: Schottky Diodes; Stock 1: 92846; Pricing 1: 1=0.84, 10=0.52, 100=0.3353 (USD); Case/Package: SMB; China RoHS: Non-Compliant; Contact Plating: Tin; Current Rating: 4A; Forward Current: 4A; Height: 2.44mm; Lead Free: Lead Free; Length: 4.5466mm; Lifecycle Status: Production; Max Operating Temperature: 150°C; Max Output Current: 4A; Max Repetitive Reverse Voltage (Vrrm): 40V; Max Reverse Voltage (DC): 40V; Max Surge Current: 100A; Manufacturer Package Identifier: SSB44-E3/52T; Min Operating Temperature: -65°C; Mount: Surface Mount; Number of Pins: 2; Number of Terminals: 2; Output Current: 4A; Packaging: Cut Tape; Peak Non-Repetitive Surge Current: 100A; Peak Reverse Current: 400µA; Radiation Hardening: No; REACH SVHC: No; Reverse Standoff Voltage: 40V; Schedule B: 8541100080, 8541100080|8541100080|8541100080|8541100080|8541100080; Voltage Rating (DC): 40V; ComponentLink1URL: https://datasheet.octopart.com:443/SSB44-E3-52T-Vishay-datasheet-181475158.pdf?src-supplier=Newark; ComponentLink1Description: https://datasheet.octopart.com:443/SSB44-E3-52T-Vishay-datasheet-181475158.pdf?src-supplier=Newark; ComponentLink2URL: https://datasheet.octopart.com:443/SSB44-E3-52T-Vishay-datasheet-11777709.pdf?src-supplier=Newark; ComponentLink2Description: https://datasheet.octopart.com:443/SSB44-E3-52T-Vishay-datasheet-11777709.pdf?src-supplier=Newark; ComponentLink3URL: https://datasheet.octopart.com:443/SSB44-E3-52T-Vishay-datasheet-10060009.pdf?src-supplier=Newark; ComponentLink3Description: https://datasheet.octopart.com:443/SSB44-E3-52T-Vishay-datasheet-10060009.pdf?src-supplier=Newark; ComponentLink4URL: https://datasheet.octopart.com:443/SSB44-E3-52T-Vishay-datasheet-8331249.pdf?src-supplier=Newark; ComponentLink4Description: https://datasheet.octopart.com:443/SSB44-E3-52T-Vishay-datasheet-8331249.pdf?src-supplier=Newark; ComponentLink5URL: https://datasheet.octopart.com:443/SSB44-E3-52T-Vishay-datasheet-22977460.pdf?src-supplier=Newark; ComponentLink5Description: https://datasheet.octopart.com:443/SSB44-E3-52T-Vishay-datasheet-22977460.pdf?src-supplier=Newark; ComponentLink6URL: https://datasheet.octopart.com:443/SSB44-E3-52T-Vishay-datasheet-21270664.pdf?src-supplier=Newark; ComponentLink6Description: https://datasheet.octopart.com:443/SSB44-E3-52T-Vishay-datasheet-21270664.pdf?src-supplier=Newark; ComponentLink7URL: https://datasheet.octopart.com:443/SSB44-E3-52T-Vishay-datasheet-46750820.pdf?src-supplier=Upverter; ComponentLink7Description: https://datasheet.octopart.com:443/SSB44-E3-52T-Vishay-datasheet-46750820.pdf?src-supplier=Upverter; ComponentLink8URL: https://sigma.octopart.com:443/138898578/technical_drawing/Vishay-SSB44-E3-52T.pdf?src-supplier=Upverter; ComponentLink8Description: https://sigma.octopart.com:443/138898578/technical_drawing/Vishay-SSB44-E3-52T.pdf?src-supplier=Upverter; ComponentLink9URL: https://datasheet.octopart.com:443/SSB44-E3-52T-Vishay-datasheet-62319260.pdf?src-supplier=element14+APAC; ComponentLink9Description: https://datasheet.octopart.com:443/SSB44-E3-52T-Vishay-datasheet-62319260.pdf?src-supplier=element14+APAC; ComponentLink10URL: https://datasheet.octopart.com:443/SSB44-E3-52T-Vishay-datasheet-54005.pdf?src-supplier=element14+APAC; ComponentLink10Description: https://datasheet.octopart.com:443/SSB44-E3-52T-Vishay-datasheet-54005.pdf?src-supplier=element14+APAC; ComponentLink11URL: https://datasheet.octopart.com:443/SSB44-E3/52T-Vishay-datasheet-14186728.pdf?src-supplier=iiiC; ComponentLink11Description: https://datasheet.octopart.com:443/SSB44-E3/52T-Vishay-datasheet-14186728.pdf?src-supplier=iiiC; ComponentLink12URL: https://datasheet.octopart.com:443/SSB44-E3/52T-Vishay-datasheet-9732905.pdf?src-supplier=RS+(Formerly+Allied+Electronics); ComponentLink12Description: https://datasheet.octopart.com:443/SSB44-E3/52T-Vishay-datasheet-9732905.pdf?src-supplier=RS+(Formerly+Allied+Electronics); ComponentLink13URL: https://datasheet.octopart.com:443/SSB44-E3-52T-Vishay-datasheet-7601381.pdf?src-supplier=Jameco; ComponentLink13Description: https://datasheet.octopart.com:443/SSB44-E3-52T-Vishay-datasheet-7601381.pdf?src-supplier=Jameco; ComponentLink14URL: https://datasheet.octopart.com:443/SSB44-E3/52T-Vishay-datasheet-128407.pdf?src-supplier=DigiKey; ComponentLink14Description: https://datasheet.octopart.com:443/SSB44-E3/52T-Vishay-datasheet-128407.pdf?src-supplier=DigiKey; ComponentLink15URL: http://sigma.octopart.com:80/rohs_statement/Vishay-company-15.pdf?src-supplier=Compliance+Statements; ComponentLink15Description: http://sigma.octopart.com:80/rohs_statement/Vishay-company-15.pdf?src-supplier=Compliance+Statements; Supplier Part Number 1: SSB44-E3/52TGICT-ND
footprint DIODE_DO214AA_MBRS_VIS-M
pins: A, C

## TSX-3225 24.0000MF15X-AC3
designator Y?, comment 24MHz 9pF
Crystal 24MHz ±10ppm (Tol) ±15ppm (Stability) 9pF FUND 40Ohm 4-Pin Mini-CSMD T/R; Manufacturer: Epson; Manufacturer Part Number: TSX-3225 24.0000MF15X-AC3; ESR (Equivalent Series Resistance): 40Ω; Frequency Tolerance: 0.001%; Supplier 1: DigiKey; RoHS: Compliant; Category: Crystals; Stock 1: 44842; Pricing 1: 1=0.82, 10=0.714, 25=0.6748, 50=0.647, 100=0.6202 (USD); Case/Package: SMD/SMT; China RoHS: Compliant; Frequency: 24MHz; Frequency Stability: 15ppm; Height: 609.6µm; Lead Free: Lead Free; Length: 3.2004mm; Lifecycle Status: Production; Load Capacitance: 9pF; Max Operating Temperature: 85°C; Min Operating Temperature: -40°C; Mount: Surface Mount; REACH SVHC: Yes; Schedule B: 8541600060, 8541600060|8541600060|8541600060|8541600060|8541600060; Series Resistance: 40Ω; Termination: SMD/SMT; Tolerance: 0.001%; Weight: 15.989131mg; Width: 2.4892mm; ComponentLink1URL: https://datasheet.octopart.com:443/TSX-3225-24.0000MF15X-AC3-Epson-datasheet-61114919.pdf?src-supplier=ODG+(Origin+Data+Global); ComponentLink1Description: https://datasheet.octopart.com:443/TSX-3225-24.0000MF15X-AC3-Epson-datasheet-61114919.pdf?src-supplier=ODG+(Origin+Data+Global); ComponentLink2URL: https://datasheet.octopart.com:443/TSX-322524.0000MF15X-AC3-Epson-datasheet-180707711.pdf?src-supplier=IHS; ComponentLink2Description: https://datasheet.octopart.com:443/TSX-322524.0000MF15X-AC3-Epson-datasheet-180707711.pdf?src-supplier=IHS; ComponentLink3URL: https://datasheet.octopart.com:443/TSX-3225-24.0000MF15X-AC3-Epson-datasheet-141944207.pdf?src-supplier=Arrow.cn; ComponentLink3Description: https://datasheet.octopart.com:443/TSX-3225-24.0000MF15X-AC3-Epson-datasheet-141944207.pdf?src-supplier=Arrow.cn; ComponentLink4URL: http://sigma.octopart.com:80/149135495/reach_statement/Epson-TSX-3225-24.0000MF15X-AC3.pdf?src-supplier=Compliance+Statements; ComponentLink4Description: http://sigma.octopart.com:80/149135495/reach_statement/Epson-TSX-3225-24.0000MF15X-AC3.pdf?src-supplier=Compliance+Statements; ComponentLink5URL: http://sigma.octopart.com:80/149135496/rohs_statement/Epson-TSX-3225-24.0000MF15X-AC3.pdf?src-supplier=Compliance+Statements; ComponentLink5Description: http://sigma.octopart.com:80/149135496/rohs_statement/Epson-TSX-3225-24.0000MF15X-AC3.pdf?src-supplier=Compliance+Statements
footprint OSCCC320X250X60
pins: 1, 2, 3, 4